# Altium footprint library FootPrintLib_8.PcbLib: 590 footprints (part 30 of 37)
Each footprint in its own frame and in the unit in brackets; x right, y up, seen from the top. Pads: shape width x height; smd on the part's side, far side on the other; paste and mask are expansions set on the pad; w line width, h text height; cw(c..) or ccw(c..) is an arc to the next point about the centre after c.
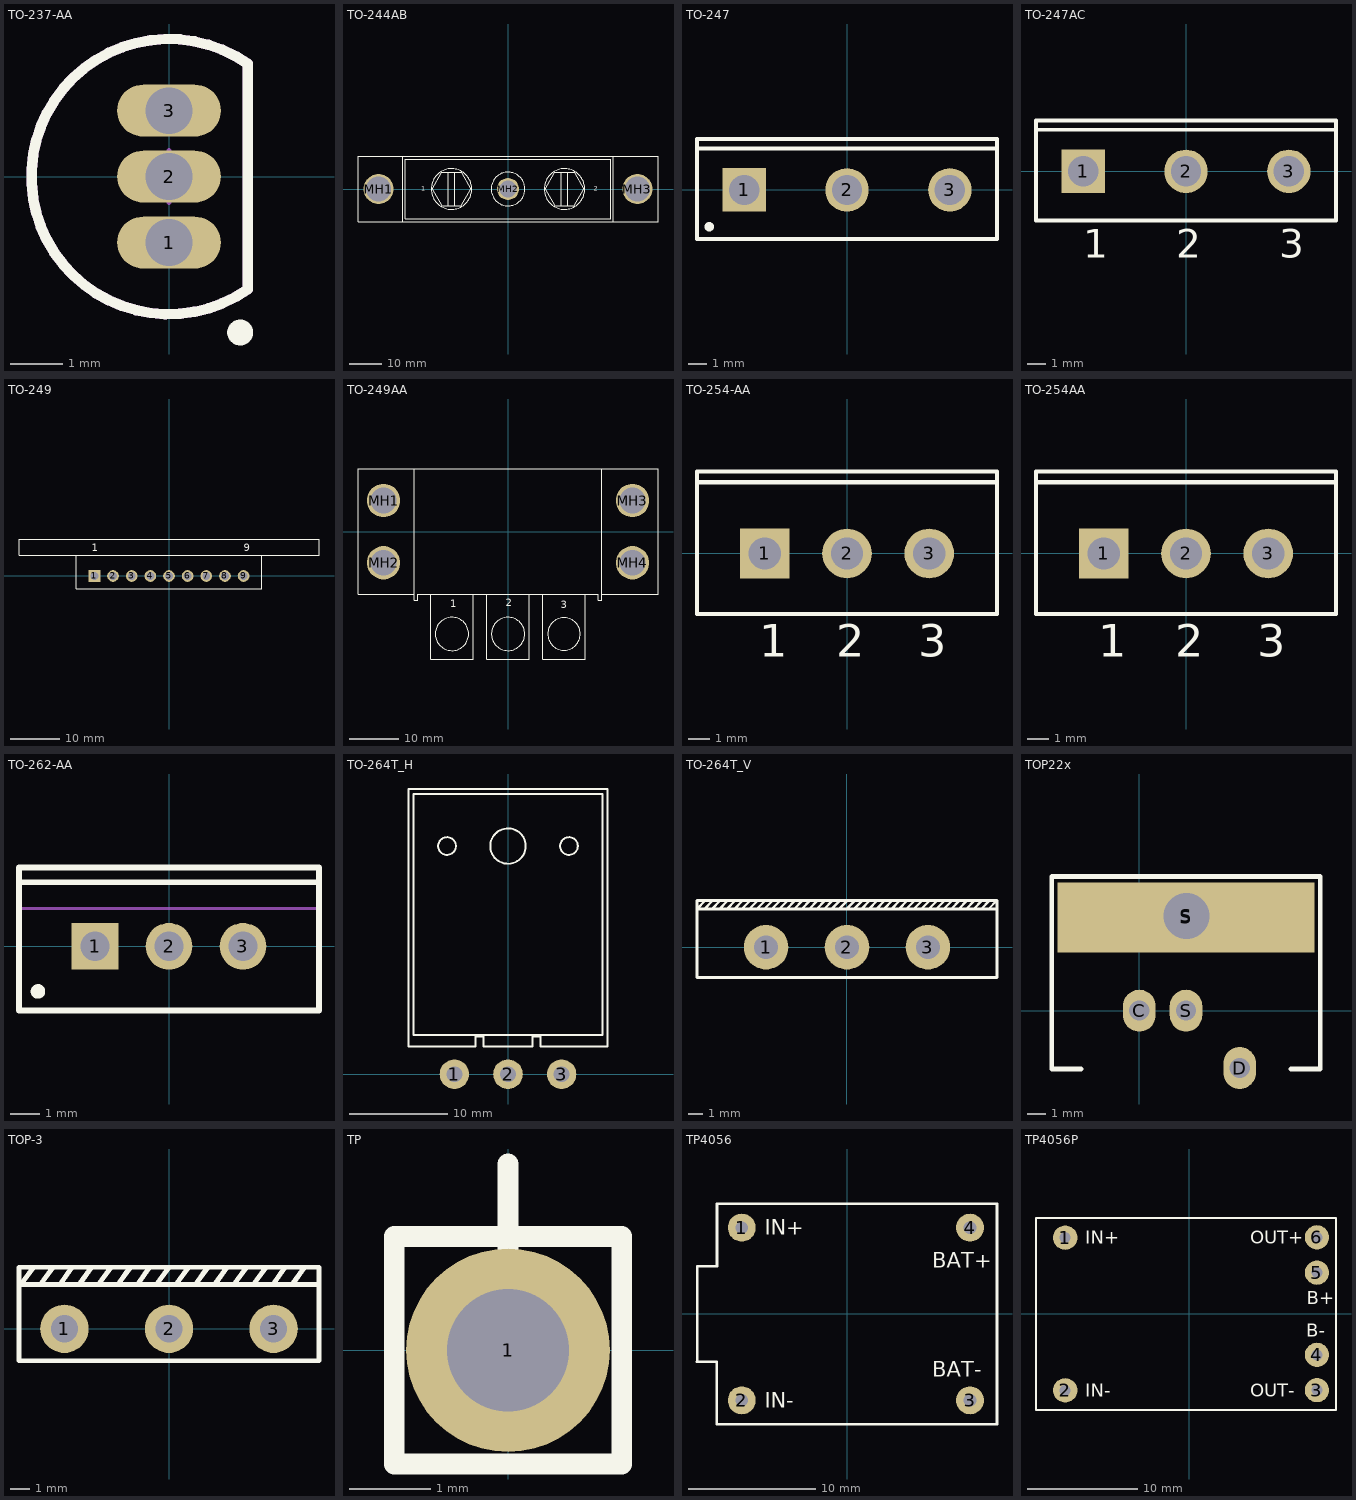
[diagram p29: the footprints below, top view; thin cyan lines are the x and y axes]

## TO-237-AA [mm] "TO, Flat Index; 3 In-Line, Axial Leads; Body Dia. 4.8mm; Lead Dia. 0.56 mm (max)"
height 7.11
pads (3):
  oval 2x1 hole 0.9: 1(0,-1.27) 2(0,0) 3(0,1.27)
Top Overlay:
  circle w0.25: c1.371,-3.003 r0.125
  lines w0.2: 1.52,-2.171 cw(c0,0) 1.52,2.171 1.52,-2.171
Mechanical 13:
  lines w0.2: 1.52,-2.171 cw(c0,0) 1.52,2.171 1.52,-2.171
Mechanical 15:
  lines w0.1: -0.5,0 0.5,0 ; 0,-0.5 0,0.5
3D body: height 7.11, standoff 0, extent -2.651,-2.661 1.52,2.661

## TO-244AB [mm] "Rectangular Flange Mount/TO-244-AB; 2 Screw Terminals; Body 92.71 x 20.32 x 23.55 mm (LxWxH max)"
height 23.55
pads (3):
  round 9.3 hole 7.8: MH1(-40.005,0) MH3(40.005,0)
  round 6.8 hole 5.3: MH2(0,0)
Top Overlay:
  circle w0.2: c-17.462,0 r6.26
  circle w0.2: c17.462,0 r6.26
  circle w0.2: c0,0 r5.205
  lines w0.2: -32.5,-10.16 -32.5,10.16 ; -20.467,-5.152 -23.472,0 ; -18.465,-5.205 -18.465,5.205 ; -16.46,-5.205 -16.46,5.205 ; 16.46,-5.205 16.46,5.205 ; 18.465,-5.205 18.465,5.205 ; 32.5,-10.16 32.5,10.16 ; -23.472,0 -20.467,-5.205 -14.458,-5.205 -11.453,0 -14.458,5.205 -20.467,5.205 -23.472,0 ; -46.355,-10.16 46.355,-10.16 46.355,10.16 -46.355,10.16 -46.355,-10.16 ; -31.75,-9.16 -31.75,9.16 31.75,9.16 31.75,-9.16 -31.75,-9.16 ; 11.453,0 14.458,-5.205 20.467,-5.205 23.472,0 20.467,5.205 14.458,5.205 11.453,0
  text "1" at -26.82,-0.54 h1.5
  text "2" at 26.554,-0.54 h1.5

## TO-247 [mm] "SIP with Mounting Hole; 3 Leads; Body 20 x 15.6 x 5 mm (typ); Pitch 5.45 mm"
height 24.6
pads (3):
  rect 2.3x2.3 hole 1.6: 1(-5.45,0)
  round 2.3 hole 1.6: 2(0,0) 3(5.45,0)
Top Overlay:
  circle w0.25: c-7.3,-1.95 r0.125
  lines w0.2: -7.95,2.2 7.95,2.2 ; -7.95,-2.6 -7.95,2.7 7.95,2.7 7.95,-2.6 -7.95,-2.6
Mechanical 13:
  lines w0.1: -7.95,-2.6 -7.95,2.7 7.95,2.7 7.95,-2.6 -7.95,-2.6
Mechanical 15:
  lines w0.1: -0.5,0 0.5,0 ; 0,-0.5 0,0.5
3D body: height 24.6, standoff 3.7, extent -7.949,-2.599 7.949,2.699

## TO-247AC [mm] "SIP with Mounting Hole; 3 Leads; Body 20 x 15.6 x 5 mm (typ); Pitch 5.45 mm"
height 24.6
pads (3):
  rect 2.3x2.3 hole 1.6: 1(-5.45,0)
  round 2.3 hole 1.6: 2(0,0) 3(5.45,0)
Top Overlay:
  lines w0.2: -7.95,2.2 7.95,2.2 ; -7.95,-2.6 -7.95,2.7 7.95,2.7 7.95,-2.6 -7.95,-2.6
  text "3" at 4.942,-4.575 h1.5
  text "2" at -0.508,-4.575 h1.5
  text "1" at -5.45,-4.575 h1.5

## TO-249 [mm] "Rectangular Flange Mount, Thru-Hole; 9 Leads; Pitch 3.81 mm"
height 25.7
pads (9):
  rect 2.4x2.4 hole 1.6: 1(-15.24,0)
  round 2.4 hole 1.6: 2(-11.43,0) 3(-7.62,0) 4(-3.81,0) 5(0,0) 6(3.81,0) 7(7.62,0) 8(11.43,0) 9(15.24,0)
Top Overlay:
  lines w0.2: -18.95,4.25 -18.95,-2.65 18.95,-2.65 18.95,4.25 ; -30.65,4.25 -30.65,7.55 30.65,7.55 30.65,4.25 -30.65,4.25
  text "1" at -15.748,5.08 h1.5
  text "9" at 15.24,5.08 h1.5

## TO-249AA [mm] "Rectangular Flange Mount/TO-249-AA; 3 Terminals; Body 61.21 x 25.65 x 10.16 mm  (LxWxH max)"
height 10.16
pads (4):
  round 6.8 hole 5.3: MH1(-25.4,6.35) MH2(-25.4,-6.35) MH3(25.4,6.35) MH4(25.4,-6.35)
Top Overlay:
  circle w0.2: c11.43,-20.877 r3.318
  circle w0.2: c0,-20.877 r3.4
  circle w0.2: c-11.43,-20.877 r3.4
  lines w0.2: -19.177,12.827 -19.177,-12.827 ; -15.75,-12.827 -15.75,-26.037 -7.11,-26.037 -7.11,-12.827 ; -4.32,-12.827 -4.32,-26.037 4.32,-26.037 4.32,-12.827 ; 7.11,-12.827 7.11,-26.037 15.75,-26.037 15.75,-12.827 ; 19.177,12.827 19.177,-12.827 ; -19.177,-12.827 -19.177,-13.967 -18.427,-13.967 -18.427,-12.827 18.427,-12.827 18.427,-13.967 19.177,-13.967 19.177,-12.827 ; -19.177,-12.827 -30.607,-12.827 -30.607,12.827 30.607,12.827 30.607,-12.827 19.177,-12.827
  text "3" at 10.799,-15.586 h1.5
  text "2" at -0.497,-15.276 h1.5
  text "1" at -11.794,-15.431 h1.5

## TO-254-AA [mm] "TO, Thru-Hole, Vertical, Heatsink Mounted; 3 In-Line Leads; Pitch 3.81 mm"
height 20.3
pads (3):
  rect 2.3x2.3 hole 1.5: 1(-3.81,0)
  round 2.3 hole 1.5: 2(0,0) 3(3.81,0)
Top Overlay:
  lines w0.2: -6.95,3.3 6.95,3.3 ; -6.95,-2.8 6.95,-2.8 6.95,3.8 -6.95,3.8 -6.95,-2.8
  text "1" at -4.06,-4.775 h1.5
  text "2" at -0.5,-4.775 h1.5
  text "3" at 3.31,-4.775 h1.5

## TO-254AA [mm] "TO, Thru-Hole, Vertical, Heatsink Mounted; 3 In-Line Leads; Pitch 3.81 mm"
height 20.3
pads (3):
  rect 2.3x2.3 hole 1.5: 1(-3.81,0)
  round 2.3 hole 1.5: 2(0,0) 3(3.81,0)
Top Overlay:
  lines w0.2: -6.95,3.3 6.95,3.3 ; -6.95,-2.8 6.95,-2.8 6.95,3.8 -6.95,3.8 -6.95,-2.8
  text "1" at -4.06,-4.775 h1.5
  text "2" at -0.5,-4.775 h1.5
  text "3" at 3.31,-4.775 h1.5

## TO-262-AA [mm] "TO, Thru-Hole, Vertical, Heatsink Mounted; 3 In-Line Leads; Pitch 2.54 mm"
height 19.7
pads (3):
  rect 1.6x1.6 hole 1: 1(-2.54,0)
  round 1.6 hole 1: 2(0,0) 3(2.54,0)
Top Overlay:
  circle w0.25: c-4.5,-1.55 r0.125
  lines w0.2: -5.15,2.2 5.15,2.2 ; -5.15,-2.2 -5.15,2.7 5.15,2.7 5.15,-2.2 -5.15,-2.2
Mechanical 13:
  lines w0.1: -5.15,1.3 5.15,1.3 ; -5.15,-2.2 -5.15,2.7 5.15,2.7 5.15,-2.2 -5.15,-2.2
Mechanical 15:
  lines w0.1: -0.5,0 0.5,0 ; 0,-0.5 0,0.5
3D body: height 19.7, standoff 13.7, extent -5.149,1.301 5.149,2.699
3D body: height 13.7, standoff 2.8, extent -5.2,-2.25 5.2,2.75

## TO-264T_H [mm] "TO-264T, 3-Pads, P5.45mm"
height 5.2
pads (3):
  round 3 hole 1.6: 1(-5.45,0) 2(0,0) 3(5.45,0)
Top Overlay:
  circle w0.2: c6.2,23.2 r0.9
  circle w0.2: c-6.2,23.2 r0.9
  circle w0.2: c0,23.2 r1.8
  lines w0.2: -10.1,2.8 -10.1,29 10.1,29 10.1,2.8 3.3,2.8 3.3,3.825 2.475,3.825 2.475,2.8 -2.475,2.8 -2.475,3.825 -3.3,3.825 -3.3,2.8 -10.1,2.8 ; -9.6,4 -9.6,28.5 9.6,28.5 9.6,4 -9.6,4

## TO-264T_V [mm] "TO-264T, 3-Pads, P5.45mm"
height 29
pads (3):
  round 3 hole 1.6: 1(-5.45,0) 2(0,0) 3(5.45,0)
Top Overlay:
  lines w0.15: -10.1,2.575 -9.538,3.137 ; -9.596,2.575 -9.034,3.137 ; -9.093,2.575 -8.53,3.137 ; -8.589,2.575 -8.027,3.137 ; -8.086,2.575 -7.523,3.137 ; -7.582,2.575 -7.02,3.137 ; -7.079,2.575 -6.516,3.137 ; -6.575,2.575 -6.013,3.137 ; -6.072,2.575 -5.509,3.137 ; -5.568,2.575 -5.006,3.137 ; -5.065,2.575 -4.502,3.137 ; -4.561,2.575 -3.999,3.137 ; -4.058,2.575 -3.495,3.137 ; -3.554,2.575 -2.992,3.137 ; -3.051,2.575 -2.488,3.137 ; -2.547,2.575 -1.985,3.137 ; -2.044,2.575 -1.481,3.137 ; -1.54,2.575 -0.978,3.137 ; -1.037,2.575 -0.474,3.137 ; -0.533,2.575 0.029,3.137 ; -0.03,2.575 0.533,3.137 ; 0.474,2.575 1.037,3.137 ; 0.978,2.575 1.54,3.137 ; 1.481,2.575 2.044,3.137 ; 1.985,2.575 2.547,3.137 ; 2.488,2.575 3.051,3.137 ; 2.992,2.575 3.554,3.137 ; 3.495,2.575 4.058,3.137 ; 3.999,2.575 4.561,3.137 ; 4.502,2.575 5.065,3.137 ; 5.006,2.575 5.568,3.137 ; 5.509,2.575 6.072,3.137 ; 6.013,2.575 6.575,3.137 ; 6.516,2.575 7.079,3.137 ; 7.02,2.575 7.582,3.137 ; 7.523,2.575 8.086,3.137 ; 8.027,2.575 8.589,3.137 ; 8.53,2.575 9.093,3.137 ; 9.034,2.575 9.596,3.137 ; 9.537,2.588 10.1,3.15
  lines w0.2: -10.1,2.575 10.1,2.575 ; -10.1,-2.05 -10.1,3.15 10.1,3.15 10.1,-2.05 -10.1,-2.05

## TOP22x [mil]
pads (5):
  oval 70x90 hole 43.31: C(0,0) D(215,-123) S(100,0)
  rect 550x150 all layers, no hole: S(100,200)
  round 106.3 hole 98.43: S(101,203)
Top Overlay:
  lines w10: -125,-125 -187.5,-125 -187.5,287.5 387.5,287.5 387.5,-125 325,-125

## TOP-3 [mm]
pads (3):
  round 2.5 hole 1.4: 1(-5.4,0) 2(0,0) 3(5.4,0)
Top Overlay:
  lines w0.254: -7.747,2.286 7.747,2.286 ; -7.584,2.358 -7,3.175 ; -6.584,2.358 -6,3.175 ; -5.584,2.358 -5,3.175 ; -4.584,2.358 -4,3.175 ; -3.584,2.358 -3,3.175 ; -2.584,2.358 -2,3.175 ; -1.584,2.358 -1,3.175 ; -0.584,2.358 0,3.175 ; 0.416,2.358 1,3.175 ; 1.416,2.358 2,3.175 ; 2.416,2.358 3,3.175 ; 3.416,2.358 4,3.175 ; 4.416,2.358 5,3.175 ; 5.416,2.358 6,3.175 ; 6.416,2.358 7,3.175 ; -7.747,-1.651 7.747,-1.651 7.747,3.175 -7.747,3.175 -7.747,-1.651
3D body "BTA_41_700_B.SLDPRT": height 24.35, standoff -10.65, extent -7.559,-1.438 7.541,2.962

## TP [mm]
pads (1):
  round 2.5 hole 1.5: 1(0,0)
Top Overlay:
  lines w0.254: 0,1.143 0,2.286 ; -1.397,-1.397 1.397,-1.397 1.397,1.397 -1.397,1.397 -1.397,-1.397

## TP4056 [mm] "Module TP4056 23/6x17/4mm"
height 4
pads (4):
  round 2.2 hole 1: 1(-8.3,6.8) 2(-8.3,-6.8) 3(9.675,-6.8) 4(9.675,6.8)
Top Overlay:
  lines w0.2: -11.825,-3.75 -10.275,-3.75 -10.275,-8.7 -10.25,-8.7 11.8,-8.7 11.8,8.7 -10.25,8.7 -10.25,3.775 -11.8,3.775 -11.8,-3.75 -11.825,-3.75
  text "IN+" at -6.5,6.225 h1.2
  text "IN-" at -6.5,-7.375 h1.2
  text "BAT+" at 6.7,3.625 h1.2
  text "BAT-" at 6.7,-4.95 h1.2
3D body "TP4056 Charger Module.STEP": height 3.72, standoff -0.15, extent -11.83,-8.5 11.75,8.5

## TP4056P [mm] "Module TP4056P 28/8x17/4mm"
height 4
pads (6):
  round 2.2 hole 1: 1(-11.25,6.925) 2(-11.25,-6.925) 3(11.575,-6.9) 4(11.575,-3.7) 5(11.575,3.75) 6(11.575,6.95)
Top Overlay:
  lines w0.2: -13.9,-8.7 -10.25,-8.7 13.3,-8.7 13.3,8.7 -13.9,8.7 -13.9,3.775 -13.9,-8.7
  text "B-" at 10.625,-2.075 h1.2
  text "B+" at 10.65,0.875 h1.2
  text "IN-" at -9.45,-7.5 h1.2
  text "IN+" at -9.45,6.35 h1.2
  text "OUT-" at 5.525,-7.5 h1.2
  text "OUT+" at 5.525,6.35 h1.2
3D body "Lipo Charger - With Load Protection.stp": height 4.28, standoff 0, extent -13.772,-8.547 13.132,8.547